# Altium schematic symbol library EEE-FK1E101P.SchLib: 1 symbol
Pins are listed as number, name and electrical type; pins without a type are passive.

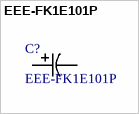
[diagram p0: symbol EEE-FK1E101P]

## EEE-FK1E101P
designator C?
Description; Manufacturer_Name: Panasonic; Copyright: Copyright (C) 2025 Ultra Librarian. All rights reserved.; Manufacturer_Part_Number: EEE-FK1E101P
footprint CAP_8 X 6.2_PAN
pins: 1, 2